# Altium footprint library Connectors.PcbLib: 305 footprints (part 3 of 20)
Each footprint in its own frame and in the unit in brackets; x right, y up, seen from the top. Pads: shape width x height; smd on the part's side, far side on the other; paste and mask are expansions set on the pad; w line width, h text height; cw(c..) or ccw(c..) is an arc to the next point about the centre after c.
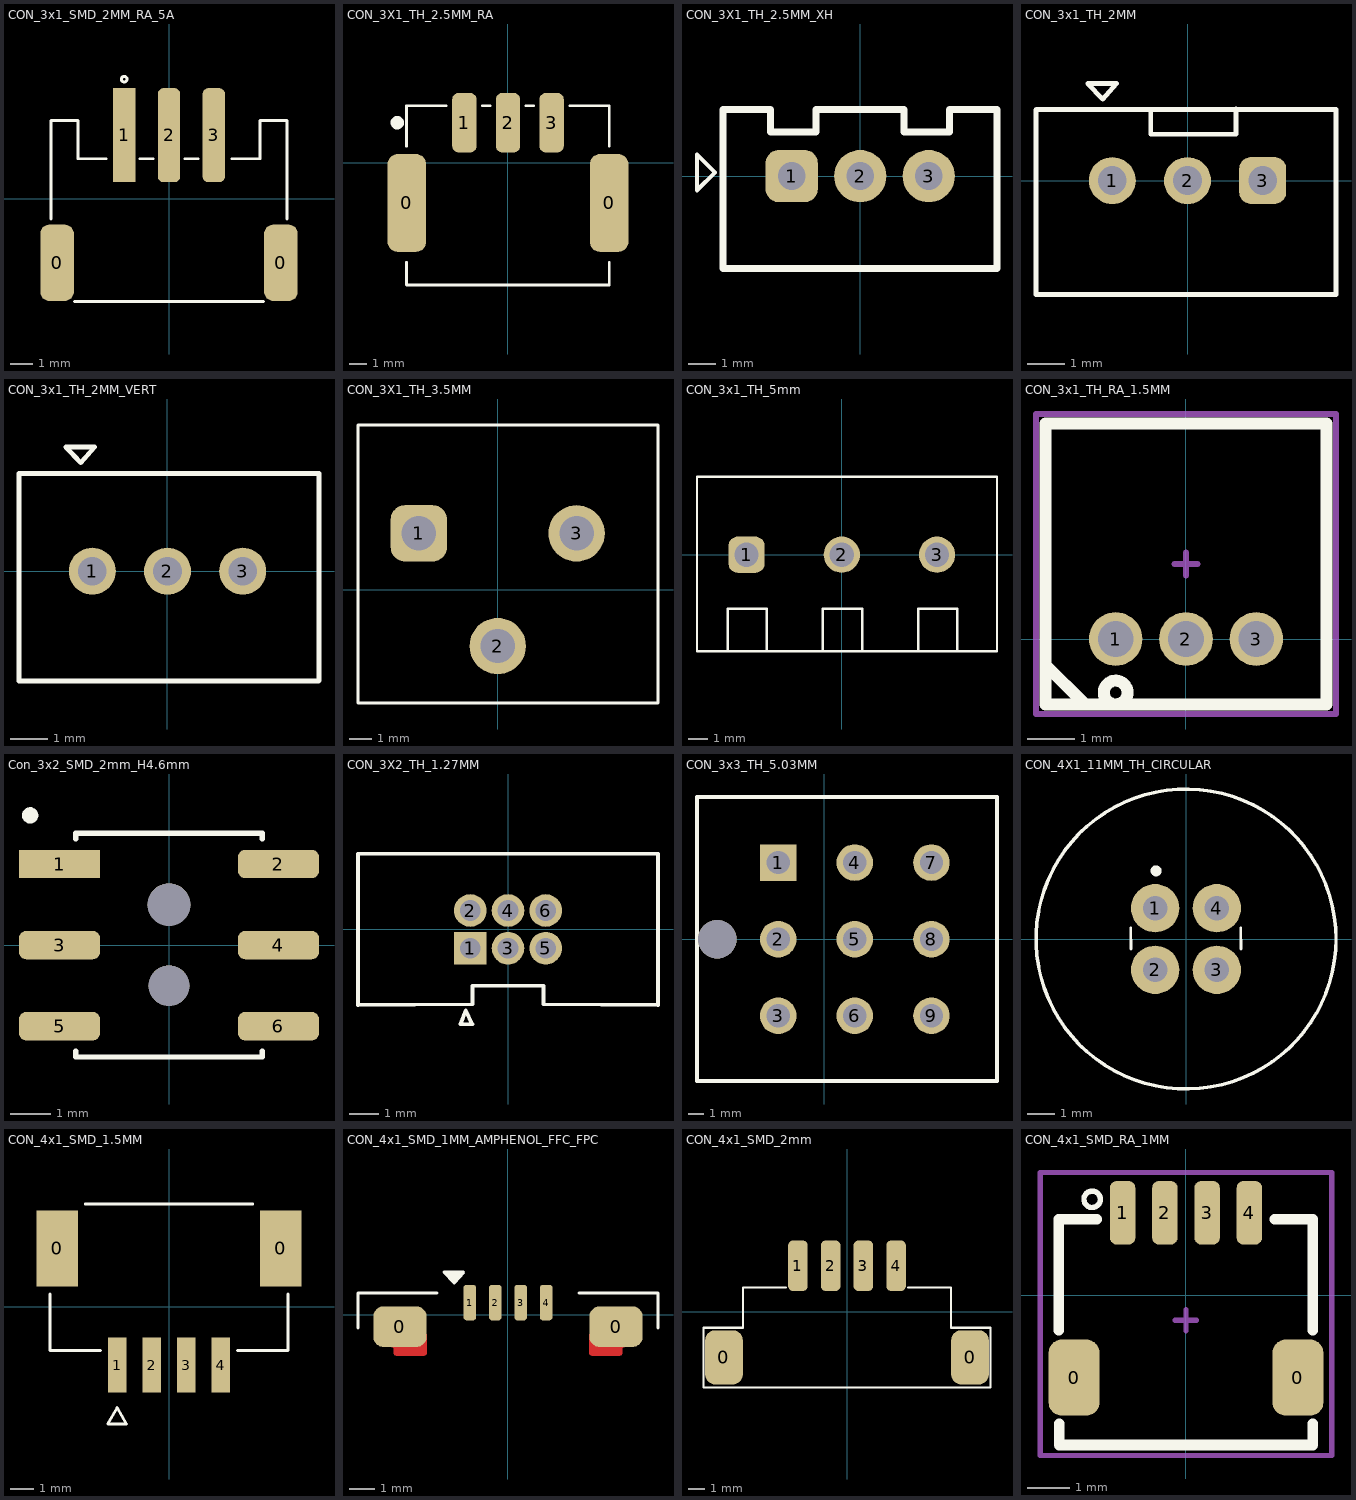
[diagram p2: the footprints below, top view; thin cyan lines are the x and y axes]

## CON_3x1_SMD_2MM_RA_5A [mm] "/20230822/J-A.Sepulveda"
pads (5):
  rrect50% 1.5x3.4 smd: 0(-5,-2.85) 0(5,-2.85)
  rect 1x4.2 smd: 1(-2,2.85)
  rrect50% 1x4.2 smd: 2(0,2.85) 3(2,2.85)
Top Overlay:
  circle w0.127: c-2,5.35 r0.125
  lines w0.127: -5.267,-0.9 -5.267,3.5 -4.062,3.5 -4.062,1.8 -2.8,1.8 ; -4.225,-4.584 4.216,-4.584 ; -1.3,1.8 -0.7,1.8 ; 0.7,1.8 1.3,1.8 ; 2.8,1.8 4.062,1.8 4.062,3.5 5.267,3.5 5.267,-0.9
3D body "140-503-417-060 - EDAC E-MATE (Pin Header) Connector.STEP": height 5.51, standoff 0.01, extent -5,-4.5 5,4.15

## CON_3X1_TH_2.5MM_RA [mm] "20220915 / E.Naranjo"
pads (5):
  rrect50% 2.2x5.6 smd: 0(-5.799,-2.3) 0(5.799,-2.3)
  rrect50% 1.397x3.404 smd: 1(-2.5,2.3) 2(0,2.3) 3(2.5,2.3)
Top Overlay:
  circle w0.508: c-6.349,2.3 r0.127
  lines w0.152: -5.816,-5.7 -5.816,-7 5.799,-7 5.799,-5.7 ; -5.816,0.947 -5.816,3.277 -3.531,3.277 ; -1.469,3.277 -1.031,3.277 ; 1.031,3.277 1.469,3.277 ; 3.531,3.277 5.799,3.277 5.799,0.947
Bottom Overlay:
  circle w0.254: c-6.349,2.3 r0.076
3D body: height 0.25, standoff 0, extent 0,-2.425 0.254,-2.171
3D body "1778777.stp": height 5.01, standoff -0.69, extent -6.611,-6.4 6.489,3.1

## CON_3X1_TH_2.5MM_XH [mil] "20221103 / E.Naranjo"
height 385.83
pads (3):
  rrect50% 75x75 hole 40: 1(-98.43,0)
  round 75 hole 40: 2(0,0) 3(98.43,0)
Top Overlay:
  lines w6: -234.45,-20.28 -234.45,30.91 -208.86,5.32 -234.45,-20.28
  lines w10: -197.24,-132.68 -197.24,95.67 -128.82,95.67 -128.82,63.15 -63.82,63.15 -63.82,95.67 63.03,95.67 63.03,63.15 128.03,63.15 128.03,95.67 196.46,95.67 196.46,-132.68 -197.24,-132.68
3D body "xhp-3.STEP": height 375.08, standoff 62.08, extent -194.79,-132.18 193.21,91.82
3D body "User Library-XH-3P_2_5_Silver.STEP": height 275.59, standoff -137.8, extent -195.28,-132.87 194.49,93.5

## CON_3x1_TH_2MM [mm] "/20210803/J-E.Pachon"
pads (3):
  round 1.25 hole 0.762: 1(-2,0) 2(0,0)
  rrect50% 1.25x1.25 hole 0.762: 3(2,0)
Top Overlay:
  lines w0.127: -0.98,1.89 -0.98,1.23 1.28,1.23 1.29,1.24 1.29,1.9 ; -4.03,-3.03 -4.03,-3.02 -4.03,1.88 -4.02,1.89 3.95,1.89 3.95,-3.03 -4.03,-3.03 ; -2.648,2.581 -1.886,2.581 -2.253,2.166 -2.648,2.581
3D body "B3B-PH-K-S.step": height 6, standoff -3.4, extent -3.95,-2.81 3.95,1.89

## CON_3x1_TH_2MM_VERT [mm] "/20220520/J-E.Pachon"
pads (3):
  round 1.25 hole 0.762: 1(-2,0) 2(0,0) 3(2,0)
Top Overlay:
  lines w0.127: -3.95,-2.92 4.02,-2.92 4.03,-2.91 4.03,1.99 4.03,2.6 -3.95,2.6 -3.95,-2.92 ; -2.7,3.3 -1.938,3.3 -2.305,2.886 -2.7,3.3
3D body "353620350.stp": height 8.26, standoff -3.54, extent -4.85,-3 4.85,2.55

## CON_3X1_TH_3.5MM [mm] "/ 20190222 / C-A.Serna.A"
height 12
pads (3):
  rrect50% 2.5x2.5 hole 1.524: 1(-3.5,2.5)
  round 2.5 hole 1.524: 2(0,-2.5) 3(3.5,2.5)
Top Overlay:
  lines w0.127: -6.2,-5.02 7.11,-5.02 7.11,7.3 -6.2,7.3 -6.2,-5.02
3D body "1764833.stp": height 13.1, standoff -5, extent -5.25,-4.8 6.75,7.2

## CON_3x1_TH_5mm [mm] "/ 20190222 / C-A.Serna.A"
height 12
pads (3):
  rrect50% 1.9x1.9 hole 1.27: 1(-5,0)
  round 1.9 hole 1.27: 2(0,0) 3(5,0)
Top Overlay:
  lines w0.127: -5.99,-5.08 -5.99,-2.83 -3.93,-2.83 -3.93,-5.08 ; -0.99,-5.08 -0.99,-2.83 1.07,-2.83 1.07,-5.077 ; 4.01,-5.08 4.01,-2.83 6.07,-2.83 6.07,-5.08 ; -7.603,-5.08 8.148,-5.08 8.148,4.102 -7.603,4.102 -7.603,-5.08
3D body "pxc_1935174_03_PT-1-5-3-5-0-H_3D.stp": height 11.7, standoff -3.2, extent -7.507,-4.988 8.063,4.012

## CON_3x1_TH_RA_1.5MM [mil] "/20200527/H-D.Garcia"
pads (3):
  round 45 hole 30: 1(-59.06,0) 2(0,0) 3(59.06,0)
Top Overlay:
  circle w10: c-59.06,-44.97 r10
  lines w10: -118.11,-21.65 -84.84,-54.92 ; -118.11,-55.12 -118.11,181.1 118.11,181.1 118.11,-55.12 -118.11,-55.12
Mechanical 15:
  lines w5: -9.84,62.99 9.84,62.99 ; 0,53.15 0,72.83 ; -125.98,-62.99 125.98,-62.99 125.98,188.98 -125.98,188.98 -125.98,-62.99
3D body "S3B-ZR.STEP": height 146.17, standoff -105.79, extent -118.11,-55.12 118.11,181.1

## Con_3x2_SMD_2mm_H4.6mm [mm] "/20230621/J-A.Sepulveda"
pads (8):
  rect 2x0.7 smd: 1(-2.7,2)
  rrect50% 2x0.7 smd: 2(2.7,2) 3(-2.7,0) 4(2.7,0) 5(-2.7,-2) 6(2.7,-2)
  round 1 hole 1 unplated: ""(0,-1)
  round 1.05 hole 1.05 unplated: ""(0,1)
Top Overlay:
  circle w0.2: c-3.425,3.2 r0.1
  lines w0.127: -2.3,-2.62 -2.3,-2.76 2.3,-2.76 2.3,-2.62 ; -2.3,2.62 -2.3,2.76 2.3,2.76 2.3,2.62
3D body "FH2.0x4.3-2x3T K4.5 W6.15.stp": height 4.6, standoff -0.7, extent -3.076,-3.2 3.075,3.2

## CON_3X2_TH_1.27MM [mm] "20230217 / E.Naranjo"
pads (6):
  rect 1.1x1.1 hole 0.7 mask+0.102: 1(-1.27,-0.635)
  round 1.1 hole 0.7 mask+0.102: 2(-1.27,0.635) 3(0,-0.635) 4(0,0.635) 5(1.27,-0.635) 6(1.27,0.635)
Top Overlay:
  lines w0.127: -5.055,-2.55 -5.055,2.55 5.055,2.55 5.055,-2.55 1.2,-2.527 1.2,-1.9 -1.2,-1.9 -1.2,-2.527 -5.055,-2.55 ; -1.6,-3.2 -1.423,-2.729 -1.2,-3.2 -1.6,-3.2
3D body "20021511-00006XXLFc.stp": height 5.41, standoff -2.29, extent -5.055,-2.55 5.055,2.55

## CON_3x3_TH_5.03MM [mm] "/20191030/V-A.Patino"
pads (10):
  rect 2.4x2.4 hole 1.524: 1(-3.025,5.03)
  round 2.4 hole 1.524: 2(-3.025,0) 3(-3.025,-5.03) 4(2.005,5.03) 5(2.005,0) 6(2.005,-5.03) 7(7.035,5.03) 8(7.035,0) 9(7.035,-5.03)
  round 2.54 hole 2.54: ""(-7.035,0)
Top Overlay:
  lines w0.254: -8.359,-9.321 -8.359,9.348 11.341,9.348 11.341,-9.321 -8.359,-9.321
3D body "010181090.stp": height 10.68, standoff -4.31, extent -8.359,-9.271 11.199,9.271

## CON_4X1_11MM_TH_CIRCULAR [mil] "/20220602/F-A.Ospina"
pads (4):
  round 70 hole 35: 1(-44.49,44.49) 2(-44.49,-44.49) 3(44.49,-44.49) 4(44.49,44.49)
Top Overlay:
  circle w5: c0,0 r216.54
  circle w7.87: c-43.31,98.43 r3.94
  lines w4: -79.8,15.75 -79.49,-14.49 ; 79.17,15.75 79.49,-14.49
3D body "HR10-7R-4SA-73---3DModel-STEP-1.STEP": height 503.94, standoff -106.3, extent -227.26,-216.03 227.34,217.04

## CON_4x1_SMD_1.5MM [mm] "/20220520/J-E.Pachon"
pads (6):
  rect 1.8x3.3 smd: 0(-4.85,2.525) 0(4.85,2.525)
  rect 0.8x2.4 smd: 1(-2.25,-2.525) 2(-0.75,-2.525) 3(0.75,-2.525) 4(2.25,-2.525)
Top Overlay:
  lines w0.127: -5.15,0.555 -5.15,-1.905 -2.97,-1.905 ; -3.63,4.445 3.63,4.445 ; 2.97,-1.905 5.15,-1.905 5.15,0.555 ; -2.65,-5.075 -2.25,-4.375 -1.85,-5.075 -2.65,-5.075
3D body "5025840460.stp": height 7.11, standoff -0.19, extent -5.2,-3.325 5.1,4.305

## CON_4x1_SMD_1MM_AMPHENOL_FFC_FPC [mm] "/ 20220329 / V-A.Patino"
pads (6):
  rrect50% 2.1x1.6 smd: 0(-4.25,-0.475) 0(4.25,-0.475)
  rrect50% 0.5x1.4 smd: 1(-1.5,0.475) 2(-0.5,0.475) 3(0.5,0.475) 4(1.5,0.475)
Top Layer:
  region: -4.498,-0.77 -3.199,-0.77 -3.199,-1.506 -3.199,-1.529 -3.217,-1.572 -3.249,-1.604 -3.292,-1.622 -3.315,-1.622 -4.379,-1.622 -4.402,-1.622 -4.446,-1.604 -4.48,-1.57 -4.498,-1.526 -4.498,-1.502 -4.498,-1.35 -4.499,-1.336 -4.51,-1.309 -4.53,-1.288 -4.556,-1.276 -4.571,-1.275 -4.571,-0.842 -4.571,-0.828 -4.56,-0.801 -4.539,-0.781 -4.513,-0.77
  region: 4.498,-0.77 3.199,-0.77 3.199,-1.506 3.199,-1.529 3.217,-1.572 3.249,-1.604 3.292,-1.622 3.315,-1.622 4.379,-1.622 4.402,-1.622 4.446,-1.604 4.48,-1.57 4.498,-1.526 4.498,-1.502 4.498,-1.35 4.499,-1.336 4.51,-1.309 4.53,-1.288 4.556,-1.276 4.571,-1.275 4.571,-0.842 4.571,-0.828 4.56,-0.801 4.539,-0.781 4.513,-0.77
Top Overlay:
  region: -1.748,1.673 -2.51,1.673 -2.115,1.258
  lines w0.127: -5.9,-0.516 -5.9,0.856 -2.793,0.856 ; 2.793,0.856 5.9,0.856 5.9,-0.516 ; -2.51,1.673 -1.748,1.673 -2.115,1.258 -2.51,1.673
3D body "f52q_4pin_asm.stp": height 2.06, standoff 0.01, extent -5.9,-4.644 5.9,0.856

## CON_4x1_SMD_2mm [mm] "/20200416/V-A.Patino"
pads (6):
  rrect50% 2.3x3.3 smd: 0(-7.52,-2.8) 0(7.52,-2.8)
  rrect50% 1.2x3.1 smd: 1(-3,2.8) 2(-1,2.8) 3(1,2.8) 4(3,2.8)
Top Overlay:
  lines w0.127: -3.734,1.473 -6.35,1.473 -6.35,-0.991 -8.763,-0.991 -8.763,-4.648 8.763,-4.648 8.763,-0.991 6.35,-0.991 6.35,1.473 3.734,1.473
3D body "DF3D-4P-2H.stp": height 5.61, standoff 0.01, extent -7.75,-4.522 7.75,3.878

## CON_4x1_SMD_RA_1MM [mm] "/20200525/H-D.Garcia"
pads (6):
  rrect50% 1.2x1.8 smd: 0(-2.65,-1.95) 0(2.65,-1.95)
  rrect50% 0.6x1.5 smd: 1(-1.5,1.95) 2(-0.5,1.95) 3(0.5,1.95) 4(1.5,1.95)
Top Overlay:
  lines w0.127: -2.227,2.465 ccw(c-2.22,2.27) -2.22,2.465
  lines w0.254: -3.015,-0.831 -3.015,1.8 -2.115,1.8 ; -3,-3.043 -3,-3.544 3,-3.544 3,-3.043 ; 2.1,1.8 3,1.8 3,-0.831
Mechanical 15:
  lines w0.127: -0.25,-0.594 0.25,-0.594 ; 0,-0.844 0,-0.344 ; -3.45,-3.794 3.45,-3.794 3.45,2.906 -3.45,2.906 -3.45,-3.794
3D body "5015680407.stp": height 3.21, standoff 0.01, extent -3,-3.544 3,2.356